# Altium footprint library Power.PcbLib: 21 footprints (part 2 of 2)
Each footprint in its own frame and in the unit in brackets; x right, y up, seen from the top. Pads: shape width x height; smd on the part's side, far side on the other; paste and mask are expansions set on the pad; w line width, h text height; cw(c..) or ccw(c..) is an arc to the next point about the centre after c.
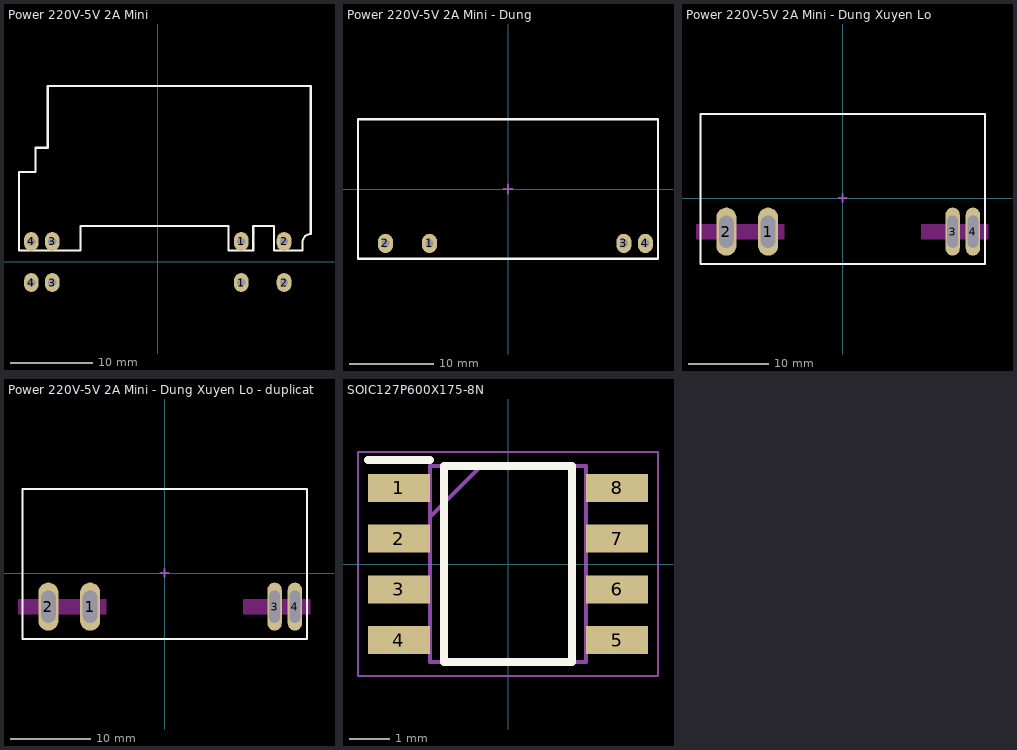
[diagram p1: the footprints below, top view; thin cyan lines are the x and y axes]

## Power 220V-5V 2A Mini [mm]
pads (8):
  oval 1.778x2.286 hole 1: 1(10.166,-2.5) 1(10.166,2.5) 2(15.373,-2.5) 2(15.373,2.5) 3(-12.833,-2.5) 3(-12.833,2.5) 4(-15.373,-2.5) 4(-15.373,2.5)
Top Overlay:
  lines w0.254: -16.873,1.4 -9.373,1.4 -9.373,4.4 8.627,4.4 8.627,1.4 11.627,1.4 11.627,4.4 14.127,4.4 14.127,1.4 17.627,1.4 17.627,2.4 cw(c18.627,2.4) 18.627,3.4 18.627,21.4 -13.373,21.4 -13.373,13.892 -14.873,13.892 -14.873,10.954 -16.873,10.954 -16.873,1.4
Top Designator:
  text ".Designator" at -2.833,8.547 h1.52
3D body: height 1.6, standoff 0, extent -16.873,1.4 18.627,21.4
3D body "User Library-TO-269AA_jam.step": height 4.3, standoff 1.6, extent 11.23,4.894 18.27,9.844
3D body "User Library-Cap electro 8x11_5x3_5mm.step": height 2.98, standoff -12.53, extent 10.318,13.097 18.369,21.148
3D body "5x5.8x1.4.stp": height -2, standoff -7.8, extent -13.475,5.405 -7.475,10.705
3D body "User Library-EE13-T304.STEP": height 13.48, standoff -3.07, extent -5.699,5.89 6.701,19.11
3D body "Tantalio.STEP": height 10.74, standoff 0.55, extent 10.242,10.211 18.243,12.601

## Power 220V-5V 2A Mini - Dung [mil]
pads (4):
  oval 70x90 hole 39.37: 1(-365.71,-253.56) 2(-570.71,-253.56) 3(539.76,-253.56) 4(639.76,-253.56)
Top Overlay:
  lines w10: -698.82,-324.8 698.82,-324.8 698.82,324.8 -698.82,324.8 -698.82,-324.8
Top Designator:
  text ".Designator" at -146.08,-11.64 h60
Mechanical 15:
  lines w10: -20,0 20,0 ; 0,-20 0,20
3D body "PCB1.step": height 794.09, standoff 6.69, extent -701.18,-330.25 696.46,334.06

## Power 220V-5V 2A Mini - Dung Xuyen Lo [mm]
pads (4):
  oval 2.5x6 hole 1.8 slot 4 at 90 deg: 1(-9.289,-4.191) 2(-14.496,-4.191)
  oval 1.8x6 hole 1.3 slot 4 at 90 deg: 3(13.71,-4.191) 4(16.25,-4.191)
Top Overlay:
  lines w0.254: -17.75,-8.25 17.75,-8.25 17.75,10.5 -17.75,10.5 -17.75,-8.25
Keep-Out Layer:
  board cut-out: -18.161,-5.041 -18.161,-3.341 -7.366,-3.341 -7.366,-5.041
  board cut-out: 9.906,-5.041 9.906,-3.341 18.034,-3.341 18.034,-5.041
Keep-Out Layer:
  lines w0.254: -18.161,-5.041 -18.161,-3.341 -7.366,-3.341 -7.366,-5.041 -18.161,-5.041 ; 9.906,-5.041 9.906,-3.341 18.034,-3.341 18.034,-5.041 9.906,-5.041
Top Designator:
  text ".Designator" at -3.774,0.775 h1.52
Mechanical 15:
  lines w0.254: -0.508,0 0.508,0 ; 0,-0.508 0,0.508
3D body "PCB1.step": height 17.37, standoff -2.63, extent -17.81,-8.388 17.69,8.485

## Power 220V-5V 2A Mini - Dung Xuyen Lo - duplicate [mm]
pads (4):
  oval 2.5x6 hole 1.8 slot 4 at 90 deg: 1(-9.289,-4.191) 2(-14.496,-4.191)
  oval 1.8x6 hole 1.3 slot 4 at 90 deg: 3(13.71,-4.191) 4(16.25,-4.191)
Top Overlay:
  lines w0.254: -17.75,-8.25 -17.75,10.5 17.75,10.5 17.75,-8.25 -17.75,-8.25
Keep-Out Layer:
  board cut-out: 9.906,-5.041 9.906,-3.341 18.034,-3.341 18.034,-5.041
  board cut-out: -18.161,-5.041 -18.161,-3.341 -7.366,-3.341 -7.366,-5.041
Keep-Out Layer:
  lines w0.254: -18.161,-5.041 -7.366,-5.041 -7.366,-3.341 -18.161,-3.341 -18.161,-5.041 ; 9.906,-5.041 18.034,-5.041 18.034,-3.341 9.906,-3.341 9.906,-5.041
Top Designator:
  text ".Designator" at -3.774,0.781 h1.52
Mechanical 15:
  lines w0.254: -0.508,0 0.508,0 ; 0,-0.508 0,0.508
3D body "2.step": height 21.5, standoff -1.5, extent -17.75,-7.593 17.75,8.3

## SOIC127P600X175-8N [mm]
pads (8):
  rect 1.55x0.7 smd: 1(-2.725,1.905) 2(-2.725,0.635) 3(-2.725,-0.635) 4(-2.725,-1.905) 5(2.725,-1.905) 6(2.725,-0.635) 7(2.725,0.635) 8(2.725,1.905)
Top Overlay:
  lines w0.2: -3.5,2.605 -1.95,2.605 ; -1.6,-2.45 -1.6,2.45 1.6,2.45 1.6,-2.45 -1.6,-2.45
Top Designator:
  text ".Designator" at -3.71,-0.344 h1.52
Mechanical 13:
  lines w0.1: -1.95,1.18 -0.68,2.45 ; -1.95,-2.45 -1.95,2.45 1.95,2.45 1.95,-2.45 -1.95,-2.45
Mechanical 15:
  lines w0.05: -3.75,-2.8 -3.75,2.8 3.75,2.8 3.75,-2.8 -3.75,-2.8
3D body "XL1509-5.0E1.stp": height 1.75, standoff 0, extent -3,-2.45 3,2.45